# Altium schematic symbol library SS14.SchLib: 1 symbol
Pins are listed as number, name and electrical type; pins without a type are passive.

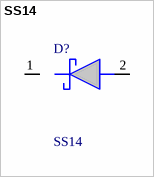
[diagram p0: symbol SS14]

## SS14
designator D?
TAIWAN SEMICONDUCTOR - SS14 - SCHOTTKY RECTIFIER, 1A, 40V, DO-214AC; Geometry.Height: 2.5mm; Manufacturer_Name: Taiwan Semiconductor; Manufacturer_Part_Number: SS14; Mouser Part Number: 821-SS14; Mouser Price/Stock: https://www.mouser.co.uk/ProductDetail/Taiwan-Semiconductor/SS14?qs=JV7lzlMm3yLIdi0ESVd3YQ%3D%3D; Arrow Part Number: SS14; Arrow Price/Stock: https://www.arrow.com/en/products/ss14/taiwan-semiconductor?utm_currency=USD&region=nac; Datasheet Link: https://www.taiwansemi.com/assets/uploads/datasheet/SS12%20SERIES_Q2102.pdf
footprint DIOM5126X250N
pins: 1 K, 2 A